# Altium footprint library UNIV_RES.PcbLib: 1 footprints
Each footprint in its own frame and in the unit in brackets; x right, y up, seen from the top. Pads: shape width x height; smd on the part's side, far side on the other; paste and mask are expansions set on the pad; w line width, h text height; cw(c..) or ccw(c..) is an arc to the next point about the centre after c.
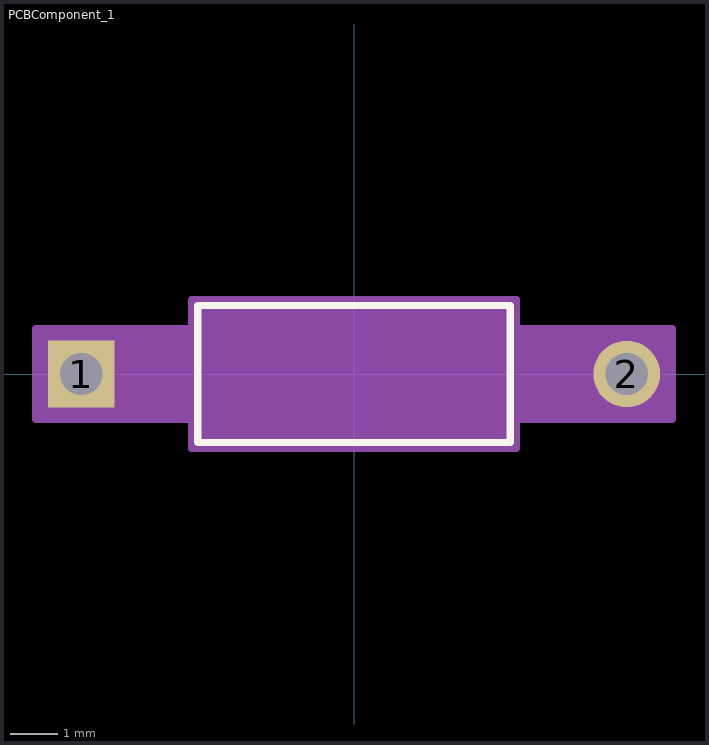
[diagram p0: the footprint, top view; thin cyan lines are the x and y axes]

## PCBComponent_1 [mil]
pads (2):
  rect 55x55 / inner round 60 / far side rect 55x55 hole 35 paste-99999 mask+0: 1(-225,0)
  round 55 / inner round 60 / far side round 55 hole 35 paste-99999 mask+0: 2(225,0)
Top Overlay:
  lines w6: -129,-56.5 129,-56.5 129,56.5 -129,56.5 -129,-56.5
Mechanical 13:
  lines w1: -225,0 -124,0 ; 124,0 225,0 ; -124,-51.5 124,-51.5 124,51.5 -124,51.5 -124,-51.5
Mechanical 15:
  region: -134,-37.5 -262.5,-37.5 -262.5,37.5 -134,37.5 -134,61.5 134,61.5 134,37.5 262.5,37.5 262.5,-37.5 134,-37.5 134,-61.5 -134,-61.5
  lines w6: -262.5,-37.5 -262.5,37.5 -134,37.5 -134,61.5 134,61.5 134,37.5 262.5,37.5 262.5,-37.5 134,-37.5 134,-61.5 -134,-61.5 -134,-37.5 -262.5,-37.5
3D body "STA_CF14_STP.step": height 103, standoff -110, extent -237.48,-51.12 237.48,51.12